# Altium schematic symbol library PRPC002SAAN-RC.SchLib: 1 symbol
Pins are listed as number, name and electrical type; pins without a type are passive.

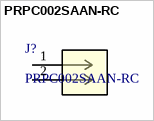
[diagram p0: symbol PRPC002SAAN-RC]

## PRPC002SAAN-RC
designator J?
CONN HEADER .100 SNGL STR 2POS; Manufacturer_Name: Sullins; Copyright: Copyright (C) 2025 Ultra Librarian. All rights reserved.; Manufacturer_Part_Number: PRPC002SAAN-RC; RefDes: RefDes; Type: Type
footprint CONN_PRPC002SAAN-RC_SUL
pins: 1, 2